# Altium footprint library Terminal_Blocks_Pluggable PCB_5.08mm.PcbLib: 299 footprints (part 2 of 19)
Each footprint in its own frame and in the unit in brackets; x right, y up, seen from the top. Pads: shape width x height; smd on the part's side, far side on the other; paste and mask are expansions set on the pad; w line width, h text height; cw(c..) or ccw(c..) is an arc to the next point about the centre after c.
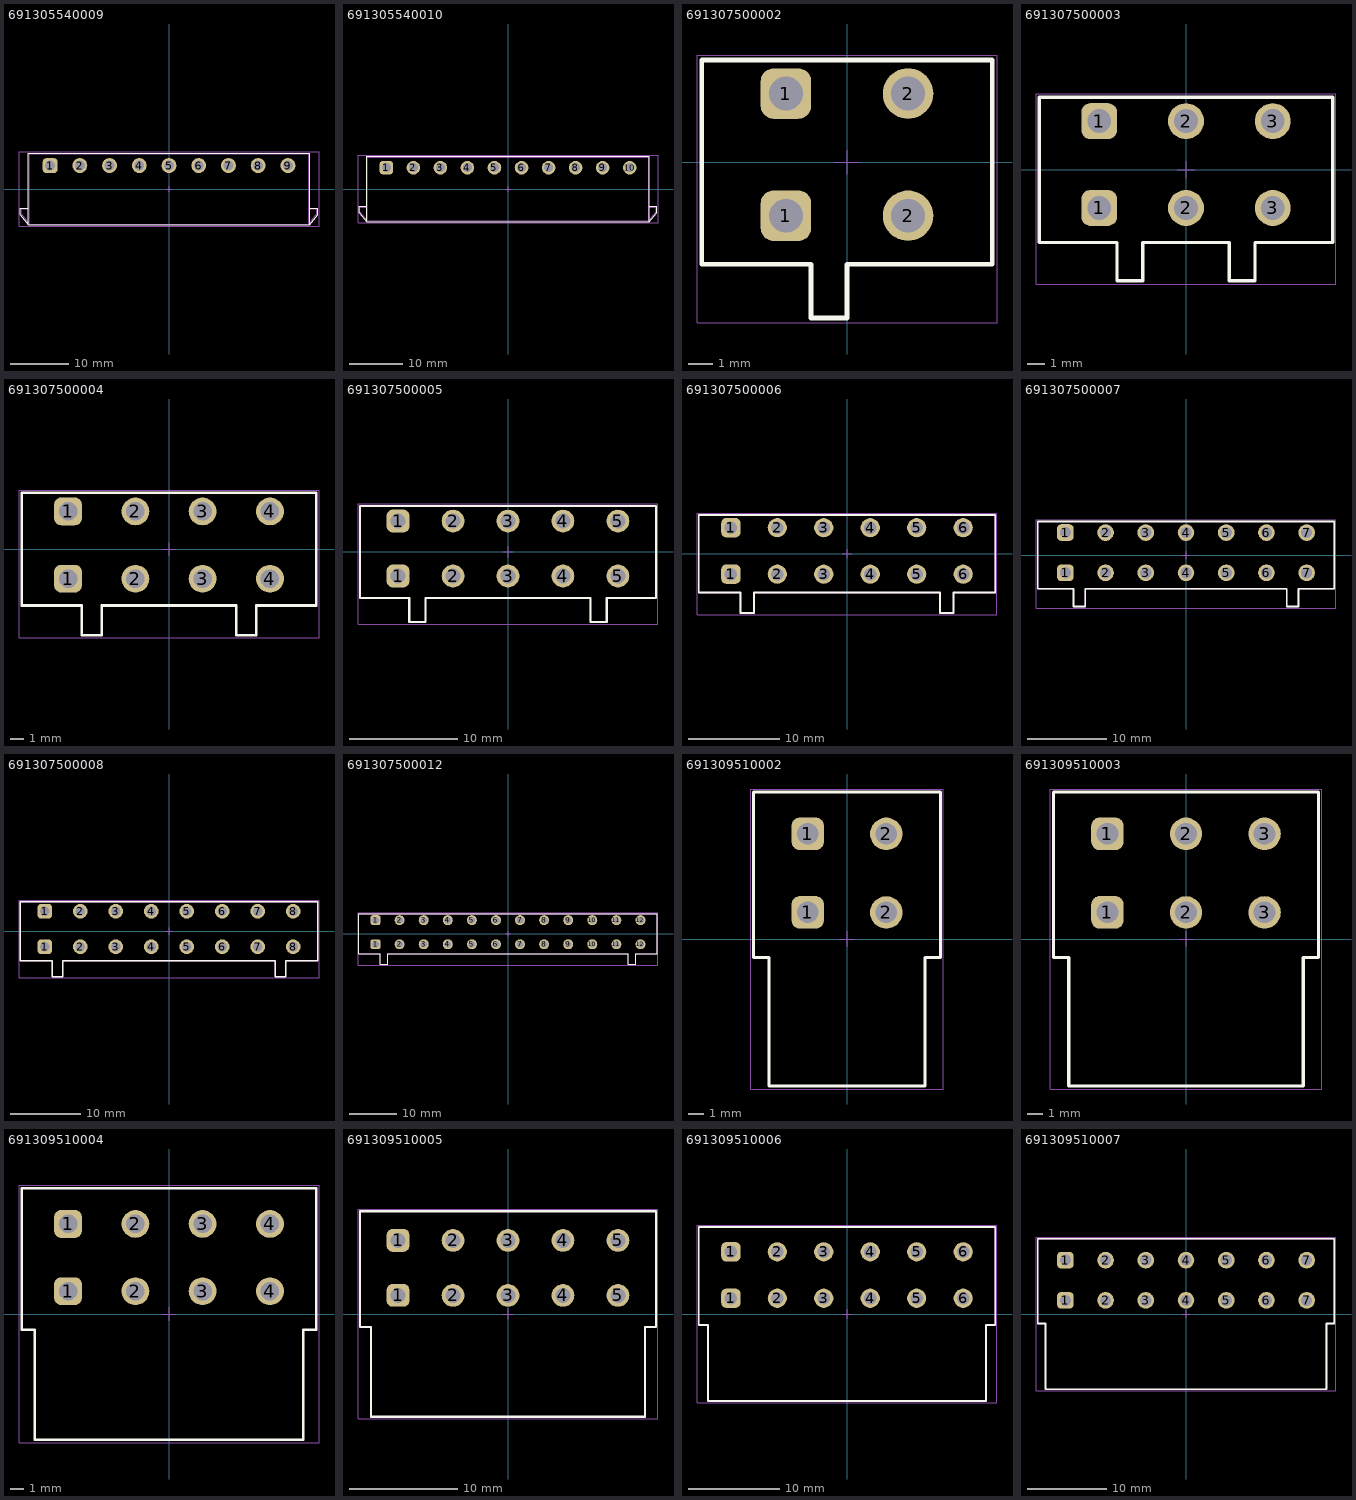
[diagram p1: the footprints below, top view; thin cyan lines are the x and y axes]

## 691305540009 [mm] "5,08mm - PCB Header Horizontal Entry with Plastic Latches - 09p"
height 8.9
pads (9):
  rrect50% 2.55x2.55 hole 1.7: 1(-20.32,4)
  round 2.55 hole 1.7: 2(-15.24,4) 3(-10.16,4) 4(-5.08,4) 5(0,4) 6(5.08,4) 7(10.16,4) 8(15.24,4) 9(20.32,4)
Top Overlay:
  lines w0.2: -24.035,-3.25 -25.435,-3.25 -25.435,-4.421 -24.035,-6.15 ; 24.035,-3.25 25.435,-3.25 25.435,-4.421 24.035,-6.15 ; -24.035,-6.15 24.035,-6.15 ; -24.035,-6.15 -24.035,6.15 24.035,6.15 24.035,-6.15
Top Designator:
  text ".Designator" at -7.498,-0.5 h1.5
Top Component Outline:
  lines w0.1: -23.86,-3.411 -25.26,-3.411 -25.26,-4.271 -23.86,-6 ; 23.86,-3.411 25.26,-3.411 25.26,-4.271 23.86,-6 ; -23.86,-6 -23.86,6 23.86,6 23.86,-6 ; -23.86,-6 23.86,-6
Top 3D Body:
  lines w0.1: -23.86,-3.411 -25.26,-3.411 -25.26,-4.271 -23.86,-6 ; 23.86,-3.411 25.26,-3.411 25.26,-4.271 23.86,-6 ; -23.86,-6 23.86,-6 ; -23.86,-6 -23.86,6 23.86,6 23.86,-6
Top Courtyard:
  lines w0.05: -25.635,-6.35 25.635,-6.35 25.635,6.35 -25.635,6.35 -25.635,-6.35
Top Component Center:
  lines w0.05: -0.5,0 0.5,0 ; 0,-0.5 0,0.5
3D body "691305540009.stp": height 8.63, standoff -3.97, extent -25.26,-6 25.26,6

## 691305540010 [mm] "5,08mm - PCB Header Horizontal Entry with Plastic Latches - 10p"
height 8.9
pads (10):
  rrect50% 2.55x2.55 hole 1.7: 1(-22.86,4)
  round 2.55 hole 1.7: 2(-17.78,4) 3(-12.7,4) 4(-7.62,4) 5(-2.54,4) 6(2.54,4) 7(7.62,4) 8(12.7,4) 9(17.78,4) 10(22.86,4)
Top Overlay:
  lines w0.2: -26.575,-3.25 -27.975,-3.25 -27.975,-4.421 -26.575,-6.15 ; 26.575,-3.25 27.975,-3.25 27.975,-4.421 26.575,-6.15 ; -26.575,-6.15 -26.575,6.15 26.575,6.15 26.575,-6.15 ; -26.575,-6.15 26.575,-6.15
Top Designator:
  text ".Designator" at -7.498,-0.5 h1.5
Top Component Outline:
  lines w0.1: -26.4,-3.411 -27.8,-3.411 -27.8,-4.271 -26.4,-6 ; 26.4,-3.411 27.8,-3.411 27.8,-4.271 26.4,-6 ; -26.4,-6 26.4,-6 ; -26.4,-6 -26.4,6 26.4,6 26.4,-6
Top 3D Body:
  lines w0.1: -26.4,-3.411 -27.8,-3.411 -27.8,-4.271 -26.4,-6 ; 26.4,-3.411 27.8,-3.411 27.8,-4.271 26.4,-6 ; -26.4,-6 -26.4,6 26.4,6 26.4,-6 ; -26.4,-6 26.4,-6
Top Courtyard:
  lines w0.05: -28.175,-6.35 -28.175,6.35 28.175,6.35 28.175,-6.35 -28.175,-6.35
Top Component Center:
  lines w0.05: -0.5,0 0.5,0 ; 0,-0.5 0,0.5
3D body "691305540010.stp": height 8.63, standoff -3.97, extent -27.8,-6 27.8,6

## 691307500002 [mm] "5.08 mm Reversed Gender Vertical PCB Header - 02p"
height 19
pads (4):
  rrect50% 2.1x2.1 hole 1.4: 1(-2.54,-2.23) 1(-2.54,2.85)
  round 2.1 hole 1.4: 2(2.54,-2.23) 2(2.54,2.85)
Top Overlay:
  lines w0.2: -6.04,-4.25 -1.5,-4.25 -1.5,-6.49 0,-6.49 0,-4.25 6.04,-4.25 6.04,4.25 -6.04,4.25 -6.04,-4.25
Top Designator:
  text ".Designator" at -7.498,-0.5 h1.5
Top Component Outline:
  lines w0.1: -6.04,-4.25 -6.04,4.25 6.04,4.25 6.04,-4.25 0,-4.25 0,-6.49 -1.5,-6.49 -1.5,-4.25 -6.04,-4.25
Top 3D Body:
  lines w0.1: -6.04,-4.25 -1.5,-4.25 -1.5,-6.49 0,-6.49 0,-4.25 6.04,-4.25 6.04,4.25 -6.04,4.25 -6.04,-4.25
Top Courtyard:
  lines w0.05: -6.24,-6.69 6.24,-6.69 6.24,4.45 -6.24,4.45 -6.24,-6.69
Top Component Center:
  lines w0.05: -0.5,0 0.5,0 ; 0,-0.5 0,0.5
3D body "691307500002.stp": height 19.15, standoff -3.35, extent -6.04,-6.55 6.04,4.25

## 691307500003 [mm] "5.08 mm Reversed Gender Vertical PCB Header - 03p"
height 19
pads (6):
  rrect50% 2.1x2.1 hole 1.4: 1(-5.08,-2.23) 1(-5.08,2.85)
  round 2.1 hole 1.4: 2(0,-2.23) 2(0,2.85) 3(5.08,-2.23) 3(5.08,2.85)
Top Overlay:
  lines w0.2: -8.58,-4.25 -8.58,4.25 8.58,4.25 8.58,-4.25 4.04,-4.25 4.04,-6.49 2.54,-6.49 2.54,-4.25 -2.54,-4.25 -2.54,-6.49 -4.04,-6.49 -4.04,-4.25 -8.58,-4.25
Top Designator:
  text ".Designator" at -7.498,-0.5 h1.5
Top Component Outline:
  lines w0.1: -8.58,-4.25 -4.04,-4.25 -4.04,-6.49 -2.54,-6.49 -2.54,-4.25 2.54,-4.25 2.54,-6.49 4.04,-6.49 4.04,-4.25 8.58,-4.25 8.58,4.25 -8.58,4.25 -8.58,-4.25
Top 3D Body:
  lines w0.1: -8.58,-4.25 -8.58,4.25 8.58,4.25 8.58,-4.25 4.04,-4.25 4.04,-6.49 2.54,-6.49 2.54,-4.25 -2.54,-4.25 -2.54,-6.49 -4.04,-6.49 -4.04,-4.25 -8.58,-4.25
Top Courtyard:
  lines w0.05: -8.78,-6.69 -8.78,4.45 8.78,4.45 8.78,-6.69 -8.78,-6.69
Top Component Center:
  lines w0.05: -0.5,0 0.5,0 ; 0,-0.5 0,0.5
3D body "691307500003.stp": height 19.15, standoff -3.35, extent -8.58,-6.55 8.58,4.25

## 691307500004 [mm] "5.08 mm Reversed Gender Vertical PCB Header - 04p"
height 19
pads (8):
  rrect50% 2.1x2.1 hole 1.4: 1(-7.62,-2.23) 1(-7.62,2.85)
  round 2.1 hole 1.4: 2(-2.54,-2.23) 2(-2.54,2.85) 3(2.54,-2.23) 3(2.54,2.85) 4(7.62,-2.23) 4(7.62,2.85)
Top Overlay:
  lines w0.2: -11.12,-4.25 -11.12,4.25 11.12,4.25 11.12,-4.25 6.58,-4.25 6.58,-6.49 5.08,-6.49 5.08,-4.25 -5.08,-4.25 -5.08,-6.49 -6.58,-6.49 -6.58,-4.25 -11.12,-4.25
Top Designator:
  text ".Designator" at -7.498,-0.5 h1.5
Top Component Outline:
  lines w0.1: -11.12,-4.25 -6.58,-4.25 -6.58,-6.49 -5.08,-6.49 -5.08,-4.25 5.08,-4.25 5.08,-6.49 6.58,-6.49 6.58,-4.25 11.12,-4.25 11.12,4.25 -11.12,4.25 -11.12,-4.25
Top 3D Body:
  lines w0.1: -11.12,-4.25 -11.12,4.25 11.12,4.25 11.12,-4.25 6.58,-4.25 6.58,-6.49 5.08,-6.49 5.08,-4.25 -5.08,-4.25 -5.08,-6.49 -6.58,-6.49 -6.58,-4.25 -11.12,-4.25
Top Courtyard:
  lines w0.05: -11.32,-6.69 -11.32,4.45 11.32,4.45 11.32,-6.69 -11.32,-6.69
Top Component Center:
  lines w0.05: -0.5,0 0.5,0 ; 0,-0.5 0,0.5
3D body "691307500004.stp": height 19.15, standoff -3.35, extent -11.12,-6.55 11.12,4.25

## 691307500005 [mm] "5.08 mm Reversed Gender Vertical PCB Header - 05p"
height 19
pads (10):
  rrect50% 2.1x2.1 hole 1.4: 1(-10.16,-2.23) 1(-10.16,2.85)
  round 2.1 hole 1.4: 2(-5.08,-2.23) 2(-5.08,2.85) 3(0,-2.23) 3(0,2.85) 4(5.08,-2.23) 4(5.08,2.85) 5(10.16,-2.23) 5(10.16,2.85)
Top Overlay:
  lines w0.2: -13.66,-4.25 -13.66,4.25 13.66,4.25 13.66,-4.25 9.12,-4.25 9.12,-6.49 7.62,-6.49 7.62,-4.25 -7.62,-4.25 -7.62,-6.49 -9.12,-6.49 -9.12,-4.25 -13.66,-4.25
Top Designator:
  text ".Designator" at -7.498,-0.5 h1.5
Top Component Outline:
  lines w0.1: -13.66,-4.25 -9.12,-4.25 -9.12,-6.49 -7.62,-6.49 -7.62,-4.25 7.62,-4.25 7.62,-6.49 9.12,-6.49 9.12,-4.25 13.66,-4.25 13.66,4.25 -13.66,4.25 -13.66,-4.25
Top 3D Body:
  lines w0.1: -13.66,-4.25 -13.66,4.25 13.66,4.25 13.66,-4.25 9.12,-4.25 9.12,-6.49 7.62,-6.49 7.62,-4.25 -7.62,-4.25 -7.62,-6.49 -9.12,-6.49 -9.12,-4.25 -13.66,-4.25
Top Courtyard:
  lines w0.05: -13.86,-6.69 -13.86,4.45 13.86,4.45 13.86,-6.69 -13.86,-6.69
Top Component Center:
  lines w0.05: -0.5,0 0.5,0 ; 0,-0.5 0,0.5
3D body "691307500005.stp": height 19.15, standoff -3.35, extent -13.66,-6.542 13.66,4.25

## 691307500006 [mm] "5.08 mm Reversed Gender Vertical PCB Header - 06p"
height 19
pads (12):
  rrect50% 2.1x2.1 hole 1.4: 1(-12.7,-2.23) 1(-12.7,2.85)
  round 2.1 hole 1.4: 2(-7.62,-2.23) 2(-7.62,2.85) 3(-2.54,-2.23) 3(-2.54,2.85) 4(2.54,-2.23) 4(2.54,2.85) 5(7.62,-2.23) 5(7.62,2.85) 6(12.7,-2.23) 6(12.7,2.85)
Top Overlay:
  lines w0.2: -16.2,-4.25 -11.66,-4.25 -11.66,-6.49 -10.16,-6.49 -10.16,-4.25 10.16,-4.25 10.16,-6.49 11.66,-6.49 11.66,-4.25 16.2,-4.25 16.2,4.25 -16.2,4.25 -16.2,-4.25
Top Designator:
  text ".Designator" at -7.498,-0.5 h1.5
Top Component Outline:
  lines w0.1: -16.2,-4.25 -16.2,4.25 16.2,4.25 16.2,-4.25 11.66,-4.25 11.66,-6.49 10.16,-6.49 10.16,-4.25 -10.16,-4.25 -10.16,-6.49 -11.66,-6.49 -11.66,-4.25 -16.2,-4.25
Top 3D Body:
  lines w0.1: -16.2,-4.25 -11.66,-4.25 -11.66,-6.49 -10.16,-6.49 -10.16,-4.25 10.16,-4.25 10.16,-6.49 11.66,-6.49 11.66,-4.25 16.2,-4.25 16.2,4.25 -16.2,4.25 -16.2,-4.25
Top Courtyard:
  lines w0.05: -16.4,-6.69 16.4,-6.69 16.4,4.45 -16.4,4.45 -16.4,-6.69
Top Component Center:
  lines w0.05: -0.5,0 0.5,0 ; 0,-0.5 0,0.5
3D body "691307500006.stp": height 19.15, standoff -3.35, extent -16.2,-6.542 16.2,4.25

## 691307500007 [mm] "5.08 mm Reversed Gender Vertical PCB Header - 07p"
height 19
pads (14):
  rrect50% 2.1x2.1 hole 1.4: 1(-15.24,-2.23) 1(-15.24,2.85)
  round 2.1 hole 1.4: 2(-10.16,-2.23) 2(-10.16,2.85) 3(-5.08,-2.23) 3(-5.08,2.85) 4(0,-2.23) 4(0,2.85) 5(5.08,-2.23) 5(5.08,2.85) 6(10.16,-2.23) 6(10.16,2.85) 7(15.24,-2.23) 7(15.24,2.85)
Top Overlay:
  lines w0.2: -18.74,-4.25 -18.74,4.25 18.74,4.25 18.74,-4.25 14.2,-4.25 14.2,-6.49 12.7,-6.49 12.7,-4.25 -12.7,-4.25 -12.7,-6.49 -14.2,-6.49 -14.2,-4.25 -18.74,-4.25
Top Designator:
  text ".Designator" at -7.498,-0.5 h1.5
Top Component Outline:
  lines w0.1: -18.74,-4.25 -14.2,-4.25 -14.2,-6.49 -12.7,-6.49 -12.7,-4.25 12.7,-4.25 12.7,-6.49 14.2,-6.49 14.2,-4.25 18.74,-4.25 18.74,4.25 -18.74,4.25 -18.74,-4.25
Top 3D Body:
  lines w0.1: -18.74,-4.25 -18.74,4.25 18.74,4.25 18.74,-4.25 14.2,-4.25 14.2,-6.49 12.7,-6.49 12.7,-4.25 -12.7,-4.25 -12.7,-6.49 -14.2,-6.49 -14.2,-4.25 -18.74,-4.25
Top Courtyard:
  lines w0.05: -18.94,-6.69 -18.94,4.45 18.94,4.45 18.94,-6.69 -18.94,-6.69
Top Component Center:
  lines w0.05: -0.5,0 0.5,0 ; 0,-0.5 0,0.5
3D body "691307500007.stp": height 19.15, standoff -3.35, extent -18.74,-6.542 18.74,4.25

## 691307500008 [mm] "5.08 mm Reversed Gender Vertical PCB Header - 08p"
height 19
pads (16):
  rrect50% 2.1x2.1 hole 1.4: 1(-17.78,-2.23) 1(-17.78,2.85)
  round 2.1 hole 1.4: 2(-12.7,-2.23) 2(-12.7,2.85) 3(-7.62,-2.23) 3(-7.62,2.85) 4(-2.54,-2.23) 4(-2.54,2.85) 5(2.54,-2.23) 5(2.54,2.85) 6(7.62,-2.23) 6(7.62,2.85) 7(12.7,-2.23) 7(12.7,2.85) 8(17.78,-2.23) 8(17.78,2.85)
Top Overlay:
  lines w0.2: -21.28,-4.25 -21.28,4.25 21.28,4.25 21.28,-4.25 16.74,-4.25 16.74,-6.49 15.24,-6.49 15.24,-4.25 -15.24,-4.25 -15.24,-6.49 -16.74,-6.49 -16.74,-4.25 -21.28,-4.25
Top Designator:
  text ".Designator" at -7.498,-0.5 h1.5
Top Component Outline:
  lines w0.1: -21.28,-4.25 -16.74,-4.25 -16.74,-6.49 -15.24,-6.49 -15.24,-4.25 15.24,-4.25 15.24,-6.49 16.74,-6.49 16.74,-4.25 21.28,-4.25 21.28,4.25 -21.28,4.25 -21.28,-4.25
Top 3D Body:
  lines w0.1: -21.28,-4.25 -21.28,4.25 21.28,4.25 21.28,-4.25 16.74,-4.25 16.74,-6.49 15.24,-6.49 15.24,-4.25 -15.24,-4.25 -15.24,-6.49 -16.74,-6.49 -16.74,-4.25 -21.28,-4.25
Top Courtyard:
  lines w0.05: -21.48,-6.69 -21.48,4.45 21.48,4.45 21.48,-6.69 -21.48,-6.69
Top Component Center:
  lines w0.05: -0.5,0 0.5,0 ; 0,-0.5 0,0.5
3D body "691307500008.stp": height 19.15, standoff -3.35, extent -21.28,-6.542 21.28,4.25

## 691307500012 [mm] "5.08 mm Reversed Gender Vertical PCB Header - 12p"
height 19
pads (24):
  rrect50% 2.1x2.1 hole 1.4: 1(-27.94,-2.23) 1(-27.94,2.85)
  round 2.1 hole 1.4: 2(-22.86,-2.23) 2(-22.86,2.85) 3(-17.78,-2.23) 3(-17.78,2.85) 4(-12.7,-2.23) 4(-12.7,2.85) 5(-7.62,-2.23) 5(-7.62,2.85) 6(-2.54,-2.23) 6(-2.54,2.85) 7(2.54,-2.23) 7(2.54,2.85) 8(7.62,-2.23) 8(7.62,2.85) 9(12.7,-2.23) 9(12.7,2.85) 10(17.78,-2.23) 10(17.78,2.85) 11(22.86,-2.23) 11(22.86,2.85) 12(27.94,-2.23) 12(27.94,2.85)
Top Overlay:
  lines w0.2: -31.44,-4.25 -31.44,4.25 31.44,4.25 31.44,-4.25 26.9,-4.25 26.9,-6.49 25.4,-6.49 25.4,-4.25 -25.4,-4.25 -25.4,-6.49 -26.9,-6.49 -26.9,-4.25 -31.44,-4.25
Top Designator:
  text ".Designator" at -7.498,-0.5 h1.5
Top Component Outline:
  lines w0.1: -31.44,-4.25 -26.9,-4.25 -26.9,-6.49 -25.4,-6.49 -25.4,-4.25 25.4,-4.25 25.4,-6.49 26.9,-6.49 26.9,-4.25 31.44,-4.25 31.44,4.25 -31.44,4.25 -31.44,-4.25
Top 3D Body:
  lines w0.1: -31.44,-4.25 -31.44,4.25 31.44,4.25 31.44,-4.25 26.9,-4.25 26.9,-6.49 25.4,-6.49 25.4,-4.25 -25.4,-4.25 -25.4,-6.49 -26.9,-6.49 -26.9,-4.25 -31.44,-4.25
Top Courtyard:
  lines w0.05: -31.64,-6.69 -31.64,4.45 31.64,4.45 31.64,-6.69 -31.64,-6.69
Top Component Center:
  lines w0.05: -0.5,0 0.5,0 ; 0,-0.5 0,0.5
3D body "691307500012.stp": height 19.15, standoff -3.35, extent -31.44,-6.542 31.44,4.25

## 691309510002 [mm] "5.08 mm Reversed Gender Horizontal PCB Header - 02p"
height 8.6
pads (4):
  rrect50% 2.1x2.1 hole 1.4: 1(-2.54,1.72) 1(-2.54,6.8)
  round 2.1 hole 1.4: 2(2.54,1.72) 2(2.54,6.8)
Top Overlay:
  lines w0.2: -6.04,-1.2 -5.04,-1.2 -5.04,-9.5 5.04,-9.5 5.04,-1.2 6.04,-1.2 6.04,9.5 -6.04,9.5 -6.04,-1.2
Top Designator:
  text ".Designator" at -7.498,-0.5 h1.5
Top Component Outline:
  lines w0.1: -6.04,-1.2 -6.04,9.5 6.04,9.5 6.04,-1.2 5.04,-1.2 5.04,-9.5 -5.04,-9.5 -5.04,-1.2 -6.04,-1.2
Top 3D Body:
  lines w0.1: -6.04,-1.2 -5.04,-1.2 -5.04,-9.5 5.04,-9.5 5.04,-1.2 6.04,-1.2 6.04,9.5 -6.04,9.5 -6.04,-1.2
Top Courtyard:
  lines w0.05: -6.24,-9.7 6.24,-9.7 6.24,9.7 -6.24,9.7 -6.24,-9.7
Top Component Center:
  lines w0.05: -0.5,0 0.5,0 ; 0,-0.5 0,0.5
3D body "691309510002.stp": height 10.95, standoff -3.55, extent -6.04,-9.5 6.04,9.5

## 691309510003 [mm] "5.08 mm Reversed Gender Horizontal PCB Header - 03p"
height 8.6
pads (6):
  rrect50% 2.1x2.1 hole 1.4: 1(-5.08,1.72) 1(-5.08,6.8)
  round 2.1 hole 1.4: 2(0,1.72) 2(0,6.8) 3(5.08,1.72) 3(5.08,6.8)
Top Overlay:
  lines w0.2: -8.58,-1.2 -8.58,9.5 8.58,9.5 8.58,-1.2 7.58,-1.2 7.58,-9.5 -7.58,-9.5 -7.58,-1.2 -8.58,-1.2
Top Designator:
  text ".Designator" at -7.498,-0.5 h1.5
Top Component Outline:
  lines w0.1: -8.58,-1.2 -7.58,-1.2 -7.58,-9.5 7.58,-9.5 7.58,-1.2 8.58,-1.2 8.58,9.5 -8.58,9.5 -8.58,-1.2
Top 3D Body:
  lines w0.1: -8.58,-1.2 -8.58,9.5 8.58,9.5 8.58,-1.2 7.58,-1.2 7.58,-9.5 -7.58,-9.5 -7.58,-1.2 -8.58,-1.2
Top Courtyard:
  lines w0.05: -8.78,-9.7 -8.78,9.7 8.78,9.7 8.78,-9.7 -8.78,-9.7
Top Component Center:
  lines w0.05: -0.5,0 0.5,0 ; 0,-0.5 0,0.5
3D body "691309510003.stp": height 10.95, standoff -3.55, extent -8.58,-9.5 8.58,9.5

## 691309510004 [mm] "5.08 mm Reversed Gender Horizontal PCB Header - 04p"
height 8.6
pads (8):
  rrect50% 2.1x2.1 hole 1.4: 1(-7.62,1.72) 1(-7.62,6.8)
  round 2.1 hole 1.4: 2(-2.54,1.72) 2(-2.54,6.8) 3(2.54,1.72) 3(2.54,6.8) 4(7.62,1.72) 4(7.62,6.8)
Top Overlay:
  lines w0.2: -11.12,-1.2 -11.12,9.5 11.12,9.5 11.12,-1.2 10.12,-1.2 10.12,-9.5 -10.12,-9.5 -10.12,-1.2 -11.12,-1.2
Top Designator:
  text ".Designator" at -7.498,-0.5 h1.5
Top Component Outline:
  lines w0.1: -11.12,-1.2 -10.12,-1.2 -10.12,-9.5 10.12,-9.5 10.12,-1.2 11.12,-1.2 11.12,9.5 -11.12,9.5 -11.12,-1.2
Top 3D Body:
  lines w0.1: -11.12,-1.2 -11.12,9.5 11.12,9.5 11.12,-1.2 10.12,-1.2 10.12,-9.5 -10.12,-9.5 -10.12,-1.2 -11.12,-1.2
Top Courtyard:
  lines w0.05: -11.32,-9.7 -11.32,9.7 11.32,9.7 11.32,-9.7 -11.32,-9.7
Top Component Center:
  lines w0.05: -0.5,0 0.5,0 ; 0,-0.5 0,0.5
3D body "691309510004.stp": height 10.95, standoff -3.55, extent -11.12,-9.5 11.12,9.5

## 691309510005 [mm] "5.08 mm Reversed Gender Horizontal PCB Header - 05p"
height 8.6
pads (10):
  rrect50% 2.1x2.1 hole 1.4: 1(-10.16,1.72) 1(-10.16,6.8)
  round 2.1 hole 1.4: 2(-5.08,1.72) 2(-5.08,6.8) 3(0,1.72) 3(0,6.8) 4(5.08,1.72) 4(5.08,6.8) 5(10.16,1.72) 5(10.16,6.8)
Top Overlay:
  lines w0.2: -13.66,-1.2 -12.66,-1.2 -12.66,-9.5 12.66,-9.5 12.66,-1.2 13.66,-1.2 13.66,9.5 -13.66,9.5 -13.66,-1.2
Top Designator:
  text ".Designator" at -7.498,-0.5 h1.5
Top Component Outline:
  lines w0.1: -13.66,-1.2 -13.66,9.5 13.66,9.5 13.66,-1.2 12.66,-1.2 12.66,-9.5 -12.66,-9.5 -12.66,-1.2 -13.66,-1.2
Top 3D Body:
  lines w0.1: -13.66,-1.2 -12.66,-1.2 -12.66,-9.5 12.66,-9.5 12.66,-1.2 13.66,-1.2 13.66,9.5 -13.66,9.5 -13.66,-1.2
Top Courtyard:
  lines w0.05: -13.86,-9.7 13.86,-9.7 13.86,9.7 -13.86,9.7 -13.86,-9.7
Top Component Center:
  lines w0.05: -0.5,0 0.5,0 ; 0,-0.5 0,0.5
3D body "691309510005.stp": height 10.94, standoff -3.55, extent -13.66,-9.5 13.66,9.5

## 691309510006 [mm] "5.08 mm Reversed Gender Horizontal PCB Header - 06p"
height 8.6
pads (12):
  rrect50% 2.1x2.1 hole 1.4: 1(-12.7,1.72) 1(-12.7,6.8)
  round 2.1 hole 1.4: 2(-7.62,1.72) 2(-7.62,6.8) 3(-2.54,1.72) 3(-2.54,6.8) 4(2.54,1.72) 4(2.54,6.8) 5(7.62,1.72) 5(7.62,6.8) 6(12.7,1.72) 6(12.7,6.8)
Top Overlay:
  lines w0.2: -16.2,-1.2 -16.2,9.5 16.2,9.5 16.2,-1.2 15.2,-1.2 15.2,-9.5 -15.2,-9.5 -15.2,-1.2 -16.2,-1.2
Top Designator:
  text ".Designator" at -7.498,-0.5 h1.5
Top Component Outline:
  lines w0.1: -16.2,-1.2 -15.2,-1.2 -15.2,-9.5 15.2,-9.5 15.2,-1.2 16.2,-1.2 16.2,9.5 -16.2,9.5 -16.2,-1.2
Top 3D Body:
  lines w0.1: -16.2,-1.2 -16.2,9.5 16.2,9.5 16.2,-1.2 15.2,-1.2 15.2,-9.5 -15.2,-9.5 -15.2,-1.2 -16.2,-1.2
Top Courtyard:
  lines w0.05: -16.4,-9.7 -16.4,9.7 16.4,9.7 16.4,-9.7 -16.4,-9.7
Top Component Center:
  lines w0.05: -0.5,0 0.5,0 ; 0,-0.5 0,0.5
3D body "691309510006.stp": height 10.94, standoff -3.55, extent -16.2,-9.5 16.2,9.5

## 691309510007 [mm] "5.08 mm Reversed Gender Horizontal PCB Header - 07p"
height 8.6
pads (14):
  rrect50% 2.1x2.1 hole 1.4: 1(-15.24,1.72) 1(-15.24,6.8)
  round 2.1 hole 1.4: 2(-10.16,1.72) 2(-10.16,6.8) 3(-5.08,1.72) 3(-5.08,6.8) 4(0,1.72) 4(0,6.8) 5(5.08,1.72) 5(5.08,6.8) 6(10.16,1.72) 6(10.16,6.8) 7(15.24,1.72) 7(15.24,6.8)
Top Overlay:
  lines w0.2: -18.74,-1.2 -18.74,9.5 18.74,9.5 18.74,-1.2 17.74,-1.2 17.74,-9.5 -17.74,-9.5 -17.74,-1.2 -18.74,-1.2
Top Designator:
  text ".Designator" at -7.498,-0.5 h1.5
Top Component Outline:
  lines w0.1: -18.74,-1.2 -17.74,-1.2 -17.74,-9.5 17.74,-9.5 17.74,-1.2 18.74,-1.2 18.74,9.5 -18.74,9.5 -18.74,-1.2
Top 3D Body:
  lines w0.1: -18.74,-1.2 -18.74,9.5 18.74,9.5 18.74,-1.2 17.74,-1.2 17.74,-9.5 -17.74,-9.5 -17.74,-1.2 -18.74,-1.2
Top Courtyard:
  lines w0.05: -18.94,-9.7 -18.94,9.7 18.94,9.7 18.94,-9.7 -18.94,-9.7
Top Component Center:
  lines w0.05: -0.5,0 0.5,0 ; 0,-0.5 0,0.5
3D body "691309510007.stp": height 10.94, standoff -3.55, extent -18.74,-9.5 18.74,9.5